# Altium footprint library amirlib.PcbLib: 456 footprints (part 20 of 29)
Each footprint in its own frame and in the unit in brackets; x right, y up, seen from the top. Pads: shape width x height; smd on the part's side, far side on the other; paste and mask are expansions set on the pad; w line width, h text height; cw(c..) or ccw(c..) is an arc to the next point about the centre after c.
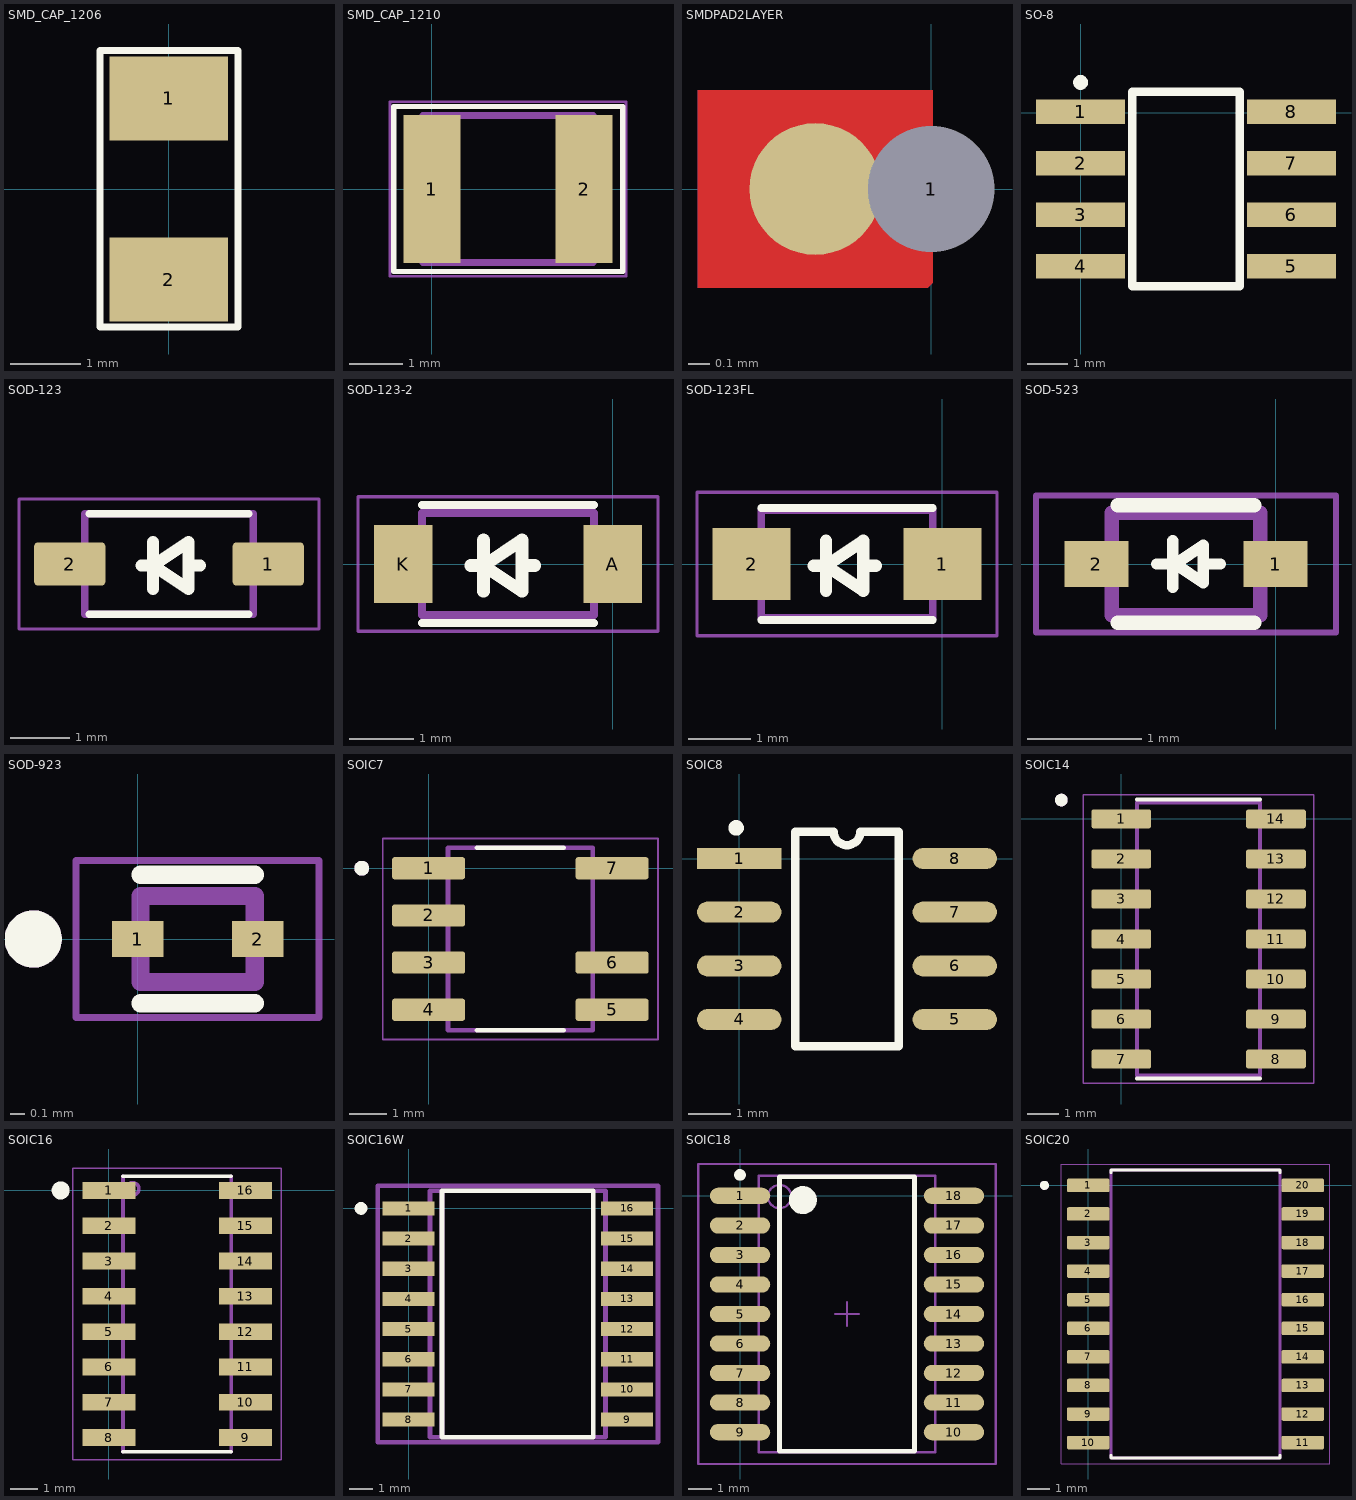
[diagram p19: the footprints below, top view; thin cyan lines are the x and y axes]

## SMD_CAP_1206 [mm]
pads (2):
  rect 1.7x1.2 smd: 1(0,1.298) 2(0,-1.298)
Top Overlay:
  lines w0.1: -0.986,-1.976 -0.986,1.986 0.995,1.986 0.995,-1.976 -0.986,-1.976
3D body "cap 1206.STEP": height 0.75, standoff 0, extent -0.775,-1.526 0.749,1.522

## SMD_CAP_1210 [mm]
pads (2):
  rect 1.07x2.77 smd: 1(0,0) 2(2.86,0)
Top Overlay:
  lines w0.1: -0.711,-1.549 3.581,-1.549 3.581,1.549 -0.711,1.549 -0.711,-1.549
Mechanical 13:
  lines w0.127: -0.17,-1.38 -0.17,1.38 3.03,1.38 3.03,-1.38 -0.17,-1.38
Mechanical 15:
  lines w0.05: -0.785,-1.635 -0.785,1.635 3.645,1.635 3.645,-1.635 -0.785,-1.635
3D body "C1210C821KGRACTU.STEP": height 1.45, standoff 0, extent -0.127,-1.25 3.073,1.25

## SMDPAD2LAYER [mm]
pads (1):
  round 0.625 hole 0.6 copper offset -0.55,0 mask-2539.97: 1(0,0)
Top Layer:
  region: -1.109,-0.47 -0.017,-0.47 0.009,-0.445 0.009,0.47 -1.109,0.47
Bottom Layer:
  region: -1.109,-0.47 -0.017,-0.47 0.009,-0.445 0.009,0.47 -1.109,0.47
Top Solder:
  region: -1.111,-0.495 -1.111,0.495 0.012,0.495 0.012,-0.495
Bottom Solder:
  region: -1.109,-0.47 -0.017,-0.47 0.009,-0.445 0.009,0.47 -1.109,0.47

## SO-8 [mm]
pads (8):
  rect 2.2x0.6 smd: 1(0,0.025) 2(0,-1.245) 3(0,-2.515) 4(0,-3.785) 5(5.2,-3.785) 6(5.2,-2.515) 7(5.2,-1.245) 8(5.2,0.025)
Top Overlay:
  circle w0.254: c0,0.75 r0.056
  lines w0.203: 1.276,-4.28 1.276,0.52 ; 1.276,-4.28 3.926,-4.28 ; 1.276,-4.28 1.276,0.52 ; 1.276,-4.28 3.926,-4.28 ; 1.276,0.52 3.926,0.52 ; 1.276,0.52 3.926,0.52 ; 3.926,-4.28 3.926,0.52
3D body "CircuitWorks-SO-8 (PIC12FXXX).STEP": height 1.6, standoff 0, extent -0.42,-4.36 5.57,0.54

## SOD-123 [mm]
pads (2):
  rrect18% 1.21x0.73 smd: 1(8.288,-7.442) 2(4.928,-7.442)
Top Overlay:
  lines w0.127: 5.258,-8.292 7.958,-8.292 ; 5.258,-6.592 7.958,-6.592
  lines w0.2: 6.137,-7.468 6.337,-7.468 ; 6.337,-7.868 6.337,-7.068 ; 6.937,-7.468 7.137,-7.468 ; 6.337,-7.468 6.937,-7.068 6.937,-7.868 6.337,-7.468
Mechanical 13:
  lines w0.127: 5.178,-8.292 8.038,-8.292 8.038,-6.592 5.178,-6.592 5.178,-8.292
Mechanical 15:
  lines w0.05: 4.068,-8.542 9.148,-8.542 9.148,-6.342 4.068,-6.342 4.068,-8.542
3D body "step_temp.STEP": height 1.43, standoff -0.02, extent 4.783,-8.217 8.433,-6.667

## SOD-123-2 [mm]
pads (2):
  rect 0.915x1.22 smd: A(0,0) K(-3.275,0)
Top Overlay:
  lines w0.127: -2.983,-0.924 -0.292,-0.924 ; -2.983,0.924 -0.292,0.924
  lines w0.2: -2.219,-0.025 -2.019,-0.025 ; -2.019,-0.425 -2.019,0.375 ; -1.419,-0.025 -1.219,-0.025 ; -2.019,-0.025 -1.419,-0.425 -1.419,0.375 -2.019,-0.025
Mechanical 13:
  lines w0.127: -2.983,-0.8 -0.292,-0.8 -0.292,0.8 -2.983,0.8 -2.983,-0.8
Mechanical 15:
  lines w0.05: -3.982,-1.05 0.707,-1.05 0.707,1.05 -3.982,1.05 -3.982,-1.05
3D body "step_temp.STEP": height 1.35, standoff 0, extent -3.479,-0.8 0.204,0.8

## SOD-123FL [mm]
pads (2):
  rect 1.25x1.16 smd: 1(0,0) 2(-3.06,0)
Top Overlay:
  lines w0.127: -2.905,-0.9 -0.155,-0.9 ; -2.905,0.9 -0.155,0.9
  lines w0.2: -2.067,-0.025 -1.867,-0.025 ; -1.867,-0.425 -1.867,0.375 ; -1.267,-0.025 -1.067,-0.025 ; -1.867,-0.025 -1.267,-0.425 -1.267,0.375 -1.867,-0.025
Mechanical 13:
  lines w0.127: -2.905,-0.863 -0.155,-0.863 -0.155,0.863 -2.905,0.863 -2.905,-0.863
Mechanical 15:
  lines w0.05: -3.935,-1.15 0.875,-1.15 0.875,1.15 -3.935,1.15 -3.935,-1.15
3D body "S1MFL.STEP": height 1.08, standoff 0, extent -3.31,-0.863 0.29,0.863

## SOD-523 [mm]
pads (2):
  rect 0.56x0.4 smd: 1(0,0) 2(-1.57,0)
Top Overlay:
  lines w0.1: -1.041,0 -0.902,0 ; -0.902,-0.203 -0.902,0.203 ; -0.635,0 -0.483,0 ; -0.881,0 -0.635,-0.164 -0.635,0.164 -0.881,0
  lines w0.127: -1.385,-0.515 -0.185,-0.515 ; -1.385,0.515 -0.185,0.515
Mechanical 13:
  lines w0.127: -1.435,-0.45 -1.435,0.45 -0.135,0.45 -0.135,-0.45 -1.435,-0.45
Mechanical 15:
  lines w0.05: -2.1,-0.6 -2.1,0.6 0.53,0.6 0.53,-0.6 -2.1,-0.6
3D body "step_temp.STEP": height 0.65, standoff 0, extent -1.585,-0.4 0.015,0.4

## SOD-923 [mm]
pads (2):
  rect 0.36x0.25 smd: 1(0,0) 2(0.84,0)
Top Overlay:
  circle w0.2: c-0.73,0 r0.1
  lines w0.127: 0.02,-0.45 0.82,-0.45 ; 0.02,0.45 0.82,0.45
Mechanical 13:
  circle w0.2: c-0.73,0 r0.1
  lines w0.127: 0.02,-0.3 0.02,0.3 0.82,0.3 0.82,-0.3 0.02,-0.3
Mechanical 15:
  lines w0.05: -0.43,-0.55 1.27,-0.55 1.27,0.55 -0.43,0.55 -0.43,-0.55
3D body "step_temp.STEP": height 0.4, standoff 0, extent -0.08,-0.3 0.92,0.3

## SOIC7 [mm]
pads (7):
  rrect25% 1.97x0.6 smd: 1(0,0) 2(0,-1.27) 3(0,-2.54) 4(0,-3.81) 5(4.94,-3.81) 6(4.94,-2.54) 7(4.94,0)
Top Overlay:
  circle w0.2: c-1.8,0 r0.1
  lines w0.127: 1.305,-4.357 3.635,-4.357 ; 1.305,0.547 3.635,0.547
Mechanical 13:
  circle w0.2: c-1.8,0 r0.1
  lines w0.127: 0.523,-4.357 4.417,-4.357 4.417,0.547 0.523,0.547 0.523,-4.357
Mechanical 15:
  lines w0.05: -1.235,-4.607 -1.235,0.797 6.175,0.797 6.175,-4.607 -1.235,-4.607
3D body "step_temp.STEP": height 1.75, standoff 0, extent -0.527,-4.356 5.467,0.546

## SOIC8 [mm]
pads (8):
  rect 2x0.5 smd: 1(0,0)
  oval 2x0.5 smd: 2(0,-1.27) 3(0,-2.54) 4(0,-3.81) 5(5.1,-3.81) 6(5.1,-2.54) 7(5.1,-1.27) 8(5.1,0)
Top Overlay:
  circle w0.254: c-0.075,0.725 r0.056
  lines w0.2: 1.325,-4.445 3.775,-4.445 3.775,0.635 2.867,0.635 cw(c2.55,0.635) 2.232,0.635 1.325,0.635 1.325,-4.445
3D body "User Library-SOIC-8-1.STEP": height 1.75, standoff 0, extent -0.3,-4.375 5.7,0.525

## SOIC14 [mm]
pads (14):
  rrect25% 1.9x0.6 smd: 1(0,0) 2(0,-1.27) 3(0,-2.54) 4(0,-3.81) 5(0,-5.08) 6(0,-6.35) 7(0,-7.62) 8(4.91,-7.62) 9(4.91,-6.35) 10(4.91,-5.08) 11(4.91,-3.81) 12(4.91,-2.54) 13(4.91,-1.27) 14(4.91,0)
Top Overlay:
  circle w0.2: c-1.9,0.6 r0.1
  lines w0.127: 0.505,-8.24 4.405,-8.24 ; 0.505,0.62 4.405,0.62
Mechanical 13:
  circle w0.2: c-1.9,0.6 r0.1
  lines w0.127: 0.505,-8.135 4.405,-8.135 4.405,0.515 0.505,0.515 0.505,-8.135
Mechanical 15:
  lines w0.05: -1.2,-8.385 6.11,-8.385 6.11,0.765 -1.2,0.765 -1.2,-8.385
3D body "step_temp.STEP": height 1.75, standoff 0, extent -0.545,-8.135 5.455,0.515

## SOIC16 [mm]
pads (16):
  rect 1.9x0.6 smd: 1(0,0) 2(0,-1.27) 3(0,-2.54) 4(0,-3.81) 5(0,-5.08) 6(0,-6.35) 7(0,-7.62) 8(0,-8.89) 9(4.91,-8.89) 10(4.91,-7.62) 11(4.91,-6.35) 12(4.91,-5.08) 13(4.91,-3.81) 14(4.91,-2.54) 15(4.91,-1.27) 16(4.91,0)
Top Overlay:
  circle w0.35: c-1.736,0 r0.15
  lines w0.127: 0.505,-9.395 4.405,-9.395 ; 0.505,0.505 4.405,0.505
Mechanical 13:
  circle w0.127: c0.855,0.055 r0.224
  lines w0.127: 0.505,-9.395 0.505,0.505 ; 4.405,-9.395 4.405,0.505
Mechanical 15:
  lines w0.05: -1.295,-9.695 6.205,-9.695 6.205,0.805 -1.295,0.805 -1.295,-9.695
3D body "EFM8BB10F8I-A-SOIC16.STEP": height 1.75, standoff 0, extent -0.418,-9.397 5.582,0.508

## SOIC16W [mm]
pads (16):
  rect 2.2x0.6 smd: 1(0,0) 2(0,-1.27) 3(0,-2.54) 4(0,-3.81) 5(0,-5.08) 6(0,-6.35) 7(0,-7.62) 8(0,-8.89) 9(9.2,-8.89) 10(9.2,-7.62) 11(9.2,-6.35) 12(9.2,-5.08) 13(9.2,-3.81) 14(9.2,-2.54) 15(9.2,-1.27) 16(9.2,0)
Top Overlay:
  circle w0.279: c-2.004,0 r0.127
  lines w0.203: 1.4,-9.635 7.775,-9.635 7.775,0.745 1.4,0.745 1.4,-9.635
Mechanical 13:
  region: 8.4,-0.245 8.4,0.245 9.92,0.245 9.92,-0.245
  region: 8.4,-1.515 8.4,-1.025 9.92,-1.025 9.92,-1.515
  region: 8.4,-2.785 8.4,-2.295 9.92,-2.295 9.92,-2.785
  region: 8.4,-4.055 8.4,-3.565 9.92,-3.565 9.92,-4.055
  region: 8.4,-5.325 8.4,-4.835 9.92,-4.835 9.92,-5.325
  region: 8.4,-6.595 8.4,-6.105 9.92,-6.105 9.92,-6.595
  region: 8.4,-7.865 8.4,-7.375 9.92,-7.375 9.92,-7.865
  region: 8.4,-9.135 8.4,-8.645 9.92,-8.645 9.92,-9.135
  region: -0.72,-9.135 -0.72,-8.645 0.8,-8.645 0.8,-9.135
  region: -0.72,-7.865 -0.72,-7.375 0.8,-7.375 0.8,-7.865
  region: -0.72,-6.595 -0.72,-6.105 0.8,-6.105 0.8,-6.595
  region: -0.72,-5.325 -0.72,-4.835 0.8,-4.835 0.8,-5.325
  region: -0.72,-4.055 -0.72,-3.565 0.8,-3.565 0.8,-4.055
  region: -0.72,-2.785 -0.72,-2.295 0.8,-2.295 0.8,-2.785
  region: -0.72,-1.515 -0.72,-1.025 0.8,-1.025 0.8,-1.515
  region: -0.72,-0.245 -0.72,0.245 0.8,0.245 0.8,-0.245
  lines w0.203: 1.4,-9.635 0.9,-9.635 0.9,0.745 1.4,0.745 ; 1.4,-9.635 8.283,-9.635 8.283,0.745 1.4,0.745 ; 1.4,-9.635 1.4,0.745
Mechanical 15:
  lines w0.2: -1.3,-9.84 10.5,-9.84 10.5,0.95 -1.3,0.95 -1.3,-9.84
3D body "step_temp.STEP": height 2.65, standoff 0, extent -0.562,-9.595 9.763,0.705

## SOIC18 [mm]
pads (18):
  oval 2.6x0.7 smd: 1(0,0) 2(0,-1.27) 3(0,-2.54) 4(0,-3.81) 5(0,-5.08) 6(0,-6.35) 7(0,-7.62) 8(0,-8.89) 9(0,-10.16) 10(9.2,-10.16) 11(9.2,-8.89) 12(9.2,-7.62) 13(9.2,-6.35) 14(9.2,-5.08) 15(9.2,-3.81) 16(9.2,-2.54) 17(9.2,-1.27) 18(9.2,0)
Top Overlay:
  circle w0.25: c0,0.9 r0.125
  circle w0.6: c2.7,-0.18 r0.3
  lines w0.2: 1.7,-10.98 1.7,0.82 7.5,0.82 7.5,-10.98 1.7,-10.98
Mechanical 13:
  circle w0.1: c1.7,-0.03 r0.5
  lines w0.1: 0.8,-11.03 0.8,0.87 8.4,0.87 8.4,-11.03 0.8,-11.03
Mechanical 15:
  lines w0.1: 4.1,-5.08 5.1,-5.08 ; 4.6,-5.58 4.6,-4.58 ; -1.8,-11.53 -1.8,1.37 11,1.37 11,-11.53 -1.8,-11.53
3D body "MCP2515-E_SO.STEP": height 2.65, standoff 0, extent -0.299,-10.83 10.001,0.72

## SOIC20 [mm]
pads (20):
  rrect25% 1.9x0.6 smd: 1(0,0) 2(0,-1.27) 3(0,-2.54) 4(0,-3.81) 5(0,-5.08) 6(0,-6.35) 7(0,-7.62) 8(0,-8.89) 9(0,-10.16) 10(0,-11.43) 11(9.53,-11.43) 12(9.53,-10.16) 13(9.53,-8.89) 14(9.53,-7.62) 15(9.53,-6.35) 16(9.53,-5.08) 17(9.53,-3.81) 18(9.53,-2.54) 19(9.53,-1.27) 20(9.53,0)
Top Overlay:
  circle w0.2: c-1.95,0 r0.1
  lines w0.127: 1.015,-11.99 1.015,-12.115 8.515,-12.115 8.515,-11.99 ; 1.015,0.56 1.015,0.685 8.515,0.685 8.515,0.56
Mechanical 13:
  circle w0.2: c-1.95,0 r0.1
  lines w0.127: 1.015,-12.115 8.515,-12.115 8.515,0.685 1.015,0.685 1.015,-12.115
Mechanical 15:
  lines w0.05: -1.2,-12.365 10.73,-12.365 10.73,0.935 -1.2,0.935 -1.2,-12.365
3D body "User Library-SOIC20.STEP": height 2.21, standoff -0.02, extent -0.251,-12.04 9.883,0.56